# Altium footprint library TPH1R403NLL1Q.PcbLib: 1 footprints
Each footprint in its own frame and in the unit in brackets; x right, y up, seen from the top. Pads: shape width x height; smd on the part's side, far side on the other; paste and mask are expansions set on the pad; w line width, h text height; cw(c..) or ccw(c..) is an arc to the next point about the centre after c.
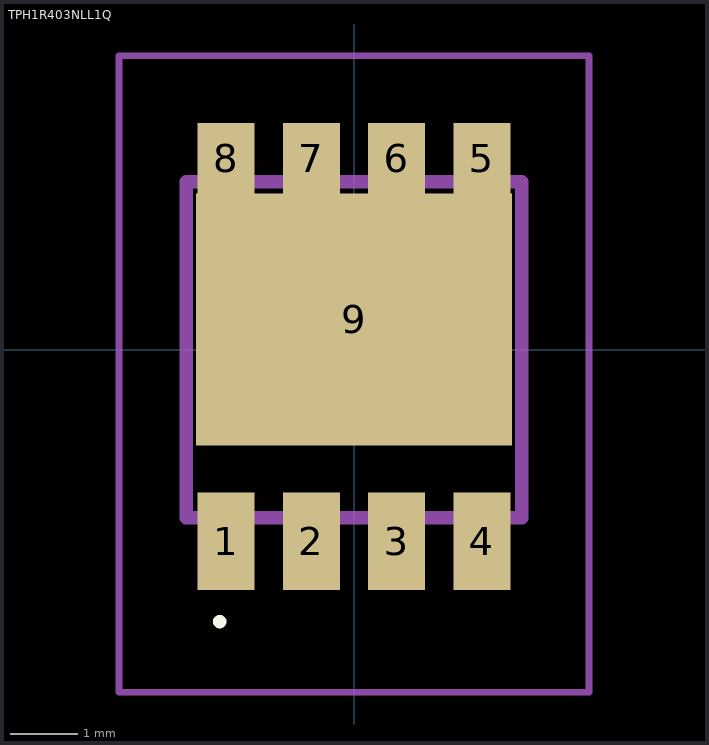
[diagram p0: the footprint, top view; thin cyan lines are the x and y axes]

## TPH1R403NLL1Q [mm]
pads (9):
  rect 0.85x1.45 smd: 1(-1.905,-2.85) 2(-0.635,-2.85) 3(0.635,-2.85) 4(1.905,-2.85)
  rect 0.85x1.05 smd: 5(1.905,2.85) 6(0.635,2.85) 7(-0.635,2.85) 8(-1.905,2.85)
  rect 4.7x3.75 smd: 9(0,0.45)
Top Overlay:
  lines w0.1: -2,-4.1 cw(c-2,-4.05) -2,-4 ; -2,-4.1 -2,-4.1 ; -2,-4.1 ccw(c-2,-4.05) -2,-4 ; -2,-4 -2,-4
Mechanical 15:
  lines w0.2: -2.5,-2.5 2.5,-2.5 2.5,2.5 -2.5,2.5 -2.5,-2.5
Mechanical 20:
  lines w0.1: -3.5,-5.1 3.5,-5.1 3.5,4.375 -3.5,4.375 -3.5,-5.1